# Altium footprint library custom-case.PcbLib: 483 footprints (part 20 of 31)
Each footprint in its own frame and in the unit in brackets; x right, y up, seen from the top. Pads: shape width x height; smd on the part's side, far side on the other; paste and mask are expansions set on the pad; w line width, h text height; cw(c..) or ccw(c..) is an arc to the next point about the centre after c.
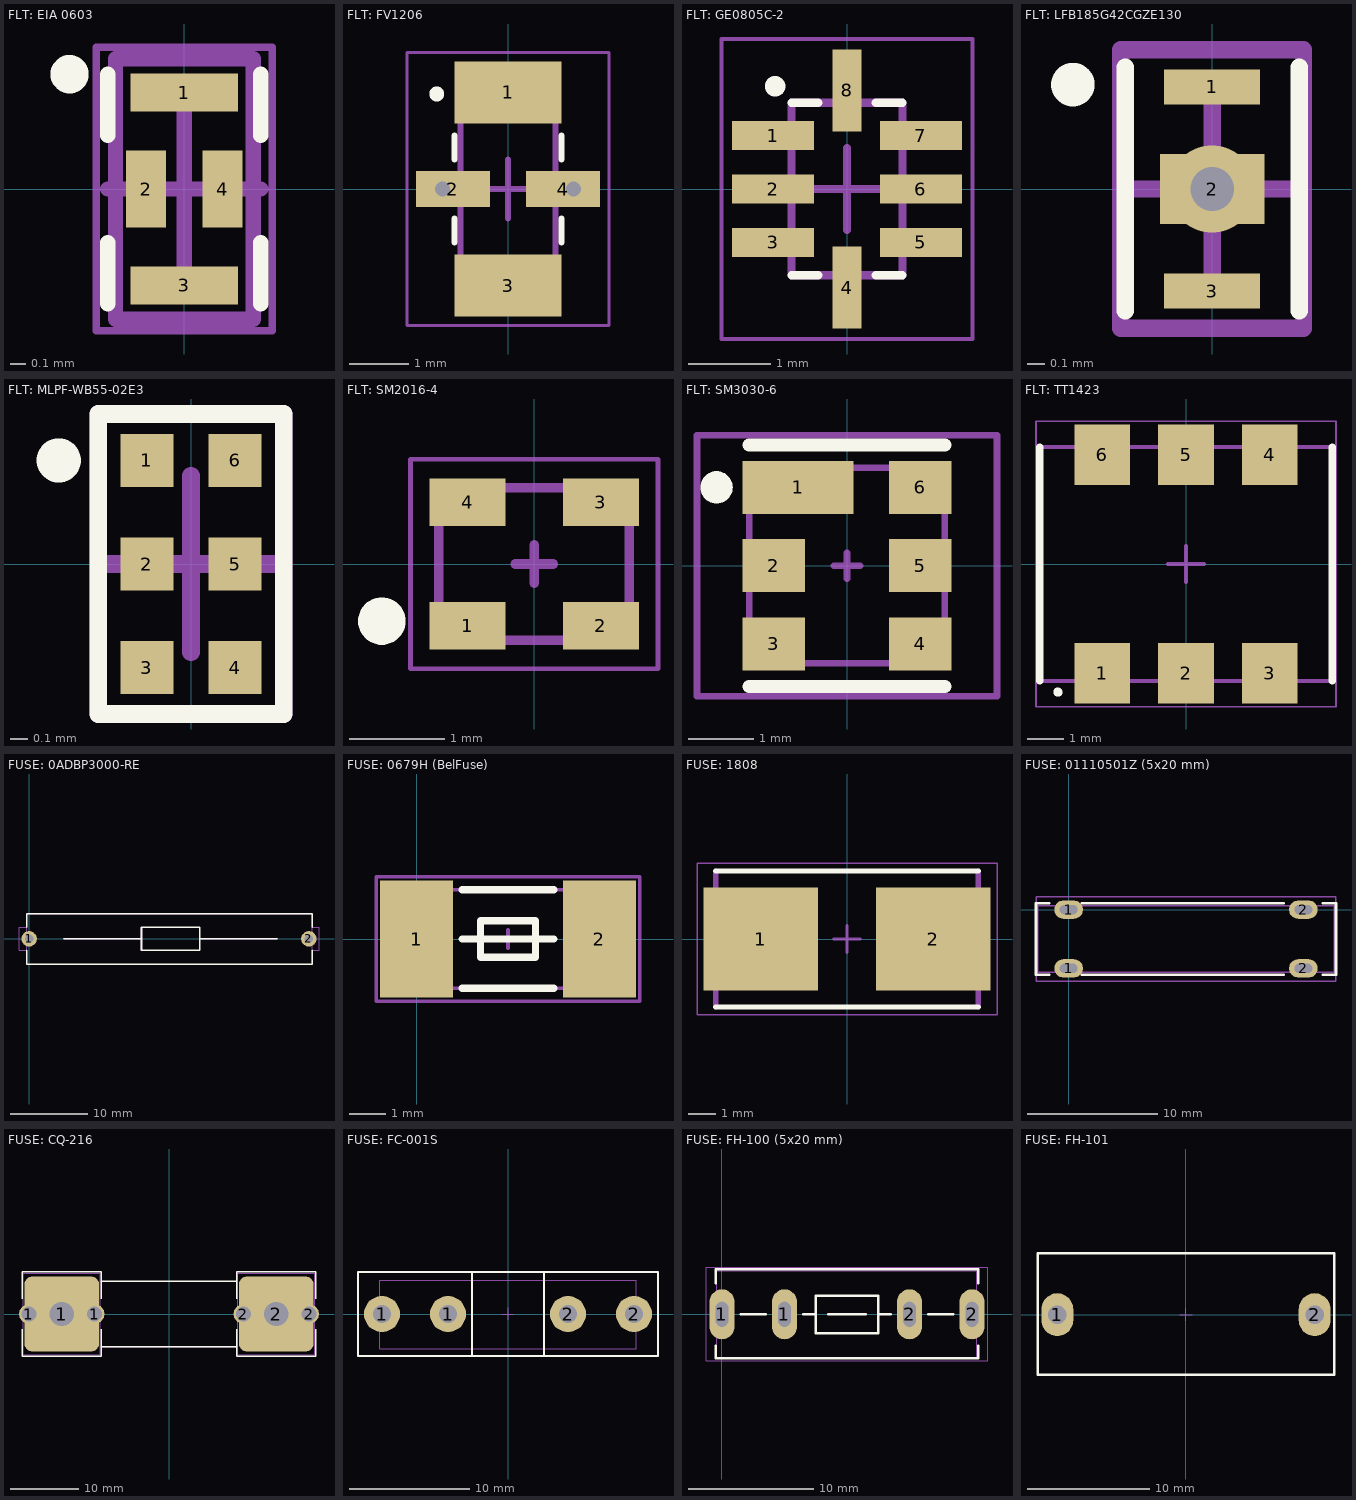
[diagram p19: the footprints below, top view; thin cyan lines are the x and y axes]

## FLT: EIA 0603 [mm] "Bandpass Filter"
height 12
pads (4):
  rect 0.7x0.25 smd: 1(0,0.63) 3(0,-0.63)
  rect 0.26x0.5 smd: 2(-0.25,0) 4(0.25,0)
Top Overlay:
  circle w0.2: c-0.75,0.75 r0.025
  lines w0.1: -0.5,-0.75 -0.5,-0.35 ; -0.5,0.35 -0.5,0.75 ; 0.5,-0.75 0.5,-0.35 ; 0.5,0.35 0.5,0.75
3D model:
  lines w0.1: -0.45,-0.85 0.45,-0.85 0.45,0.85 -0.45,0.85 -0.45,-0.85
Size Area:
  lines w0.05: -0.575,-0.925 0.575,-0.925 0.575,0.925 -0.575,0.925 -0.575,-0.925
  lines w0.1: -0.5,0 0.5,0 ; 0,-0.5 0,0.5
3D body "EIA0603.STEP": height 0.67, standoff 0.01, extent -0.4,-0.8 0.4,0.8

## FLT: FV1206 [mm] "Bandpass Filter"
height 12
pads (4):
  rect 1.8x1.04 smd: 1(0,1.625) 3(0,-1.625)
  rect 1.245x0.61 smd: 2(-0.927,0) 4(0.927,0)
via 1.1,0 diameter 0.5 hole 0.25
via -1.1,0 diameter 0.5 hole 0.25
Top Overlay:
  circle w0.2: c-1.2,1.6 r0.025
  lines w0.1: -0.9,-0.9 -0.9,-0.5 ; -0.9,0.5 -0.9,0.9 ; 0.9,-0.9 0.9,-0.5 ; 0.9,0.5 0.9,0.9
3D model:
  lines w0.1: -0.8,-1.6 0.8,-1.6 0.8,1.6 -0.8,1.6 -0.8,-1.6
Size Area:
  lines w0.05: -1.7,-2.3 1.7,-2.3 1.7,2.3 -1.7,2.3 -1.7,-2.3
  lines w0.1: -0.5,0 0.5,0 ; 0,-0.5 0,0.5
3D body "FV1206.STEP": height 1.01, standoff 0.03, extent -0.82,-1.62 0.82,1.62

## FLT: GE0805C-2 [mm] "Low Pass Filter"
height 12
pads (8):
  rect 1x0.35 smd: 1(-0.9,0.65) 2(-0.9,0) 3(-0.9,-0.65) 5(0.9,-0.65) 6(0.9,0) 7(0.9,0.65)
  rect 0.35x1 smd: 4(0,-1.2) 8(0,1.2)
Top Overlay:
  circle w0.2: c-0.875,1.25 r0.025
  lines w0.1: -0.675,-1.05 -0.35,-1.05 ; -0.675,1.05 -0.35,1.05 ; 0.35,-1.05 0.675,-1.05 ; 0.35,1.05 0.675,1.05
3D model:
  lines w0.1: -0.675,-1.05 0.675,-1.05 0.675,1.05 -0.675,1.05 -0.675,-1.05
Size Area:
  lines w0.05: -1.525,-1.825 1.525,-1.825 1.525,1.825 -1.525,1.825 -1.525,-1.825
  lines w0.1: -0.5,0 0.5,0 ; 0,-0.5 0,0.5
3D body "GE0805C-2.STEP": height 0.91, standoff -0.01, extent -0.635,-1.01 0.635,1.01

## FLT: LFB185G42CGZE130 [mm]
height 12
pads (3):
  rect 0.55x0.2 smd: 1(0,0.587) 3(0,-0.587)
  rect 0.6x0.4 smd: 2(0,0)
via 0,0 diameter 0.5 hole 0.25
Top Overlay:
  circle w0.2: c-0.8,0.6 r0.025
  lines w0.1: -0.5,-0.7 -0.5,0.7 ; 0.5,-0.7 0.5,0.7
3D model:
  lines w0.1: -0.525,-0.8 0.525,-0.8 0.525,0.8 -0.525,0.8 -0.525,-0.8
Size Area:
  lines w0.05: -0.525,-0.8 0.525,-0.8 0.525,0.8 -0.525,0.8 -0.525,-0.8
  lines w0.1: -0.5,0 0.5,0 ; 0,-0.5 0,0.5
3D body "LFB185G42CGZE130.STEP": height 0.67, standoff 0, extent -0.4,-0.8 0.4,0.8

## FLT: MLPF-WB55-02E3 [mm] "Integrated impedance matching and filter to STM32WB55Vx"
height 12
pads (6):
  rect 0.3x0.3 smd: 1(-0.25,0.587) 2(-0.25,0) 3(-0.25,-0.587) 4(0.25,-0.587) 5(0.25,0) 6(0.25,0.587)
Top Overlay:
  circle w0.2: c-0.75,0.587 r0.025
  lines w0.1: -0.525,-0.85 0.525,-0.85 0.525,0.85 -0.525,0.85 -0.525,-0.85
3D model:
  lines w0.1: -0.525,-0.85 0.525,-0.85 0.525,0.85 -0.525,0.85 -0.525,-0.85
Size Area:
  lines w0.05: -0.525,-0.85 -0.525,0.85 0.525,0.85 0.525,-0.85 -0.525,-0.85
  lines w0.1: -0.5,0 0.5,0 ; 0,-0.5 0,0.5
3D body "mlpf-wb55-01e3.STEP": height 0.41, standoff 0, extent -0.5,-0.8 0.5,0.8

## FLT: SM2016-4 [mm]
height 12
pads (5):
  rect 0.8x0.5 smd: 1(-0.7,-0.65) 2(0.7,-0.65) 3(0.7,0.65) 4(-0.7,0.65)
  round 0.5 on Top Overlay: ""(-1.6,-0.6)
Top Assy:
  circle w0.2: c-1.6,-0.6 r0.1
  lines w0.1: -1,-0.8 -1,0.8 1,0.8 1,-0.8 -1,-0.8
Size Area:
  lines w0.05: -1.3,-1.1 -1.3,1.1 1.3,1.1 1.3,-1.1 -1.3,-1.1
  lines w0.1: -0.2,0 0.2,0 ; 0,-0.2 0,0.2 ; -1,-0.8 -1,0.8 1,0.8 1,-0.8 -1,-0.8
3D body "User Library-XRCGB27M000F2P00R0.STEP": height 0.65, standoff 0, extent -1,-0.8 1,0.8

## FLT: SM3030-6 [mm] "SAW filter 3x3mm"
height 0.55
pads (7):
  rect 1.7x0.81 smd: 1(-0.75,1.2)
  rect 0.96x0.81 smd: 2(-1.125,0) 3(-1.125,-1.2) 4(1.125,-1.2) 5(1.125,0) 6(1.125,1.2)
  round 0.5 on Top Overlay: ""(-2,1.2)
Top Overlay:
  lines w0.2: -1.5,-1.85 1.5,-1.85 ; -1.5,1.85 1.5,1.85
Top Assy:
  circle w0.2: c-2,1.2 r0.1
  lines w0.1: -1.5,-1.5 -1.5,1.5 1.5,1.5 1.5,-1.5 -1.5,-1.5
Size Area:
  lines w0.1: -0.2,0 0.2,0 ; 0,-0.2 0,0.2 ; -2.3,-2 -2.3,2 2.3,2 2.3,1.2 2.3,-2 -2.3,-2
3D body "RenesasXL3225.STEP": height 0.91, standoff 0.01, extent -1.25,-1.6 1.25,1.6

## FLT: TT1423 [mm]
height 12
pads (6):
  rect 1.52x1.65 smd: 1(-2.29,-2.985) 2(0,-2.985) 3(2.29,-2.985) 4(2.29,2.985) 5(0,2.985) 6(-2.29,2.985)
Top Overlay:
  circle w0.2: c-3.5,-3.5 r0.025
  lines w0.2: -4,-3.2 -4,3.2 ; 4,-3.2 4,3.2
3D model:
  lines w0.1: -4,-3.2 -4,3.2 4,3.2 4,-3.2 -4,-3.2
Size Area:
  lines w0.05: -4.1,-3.9 -4.1,3.9 4.1,3.9 4.1,-3.9 -4.1,-3.9
  lines w0.1: -0.5,0 0.5,0 ; 0,-0.5 0,0.5
3D body "SYBP-92+.STEP": height 3.84, standoff 0.02, extent -3.935,-3.175 3.935,3.175

## FUSE: 0ADBP3000-RE [mm]
pads (2):
  round 2 hole 1.1: 1(0,0) 2(36.1,0)
Top Overlay:
  lines w0.2: -0.31,-1.5 -0.31,-3.3 36.51,-3.3 36.51,-1.5 ; -0.31,1.5 -0.31,3.25 36.51,3.25 36.51,1.5 ; 4.5,0 14.5,0 ; 22,0 32,0 ; 14.5,0 14.5,-1.5 22,-1.5 22,1.5 14.5,1.5 14.5,0
Top Assy:
  lines w0.1: 4.5,0 14.5,0 ; 22,0 32,0 ; 14.5,0 14.5,1.5 22,1.5 22,-1.5 14.5,-1.5 14.5,0 ; -0.31,-3.3 -0.31,3.25 36.51,3.25 36.51,-3.3 -0.31,-3.3
Size Area:
  lines w0.1: -1.3,-1.5 -0.31,-1.5 -0.31,-3.3 36.51,-3.3 36.51,-1.5 37.4,-1.5 37.4,1.5 36.51,1.5 36.51,3.25 -0.31,3.25 -0.31,1.5 -1.3,1.5 -1.3,-1.5
3D body "fuse.STEP": height 6.78, standoff -1.8, extent -0.31,-3.3 36.51,3.25

## FUSE: 0679H (BelFuse) [mm]
pads (2):
  rect 2x3.2 smd mask+0.075: 1(0,0) 2(5,0)
Top Overlay:
  lines w0.2: 1.25,-1.35 3.75,-1.35 ; 1.25,0 3.75,0 ; 1.25,1.35 3.75,1.35 ; 1.75,-0.5 1.75,0.5 3.25,0.5 3.25,-0.5 1.75,-0.5
Top Assy:
  lines w0.1: -0.55,-1.35 -0.55,1.35 5.55,1.35 5.55,-1.35 -0.55,-1.35
Size Area:
  lines w0.1: 2.25,0 2.75,0 ; 2.5,-0.25 2.5,0.25 ; -1.1,-1.7 6.1,-1.7 6.1,1.7 -1.1,1.7 -1.1,-1.7
3D body "User Library-fuse smd.STEP": height 2.69, standoff 0, extent -0.55,-1.35 5.55,1.34

## FUSE: 1808 [mm] "Fuse connector PCB SMD"
height 12
pads (2):
  rect 4.24x3.81 smd: 1(-3.19,0) 2(3.19,0)
Top Overlay:
  lines w0.2: -4.863,-2.515 4.863,-2.515 ; -4.863,2.515 4.863,2.515
3D model:
  lines w0.2: -4.863,-2.515 -4.863,2.515 ; 4.863,-2.515 4.863,2.515
Size Area:
  lines w0.05: -5.55,-2.8 5.55,-2.8 5.55,2.8 -5.55,2.8 -5.55,-2.8
  lines w0.1: -0.5,0 0.5,0 ; 0,-0.5 0,0.5
3D body "1808_01D.STEP": height 4.01, standoff 0, extent -4.6,-2.388 4.6,2.642

## FUSE: 01110501Z (5x20 mm) [mm]
pads (4):
  oval 2.2x1.4 hole 0.7 slot 1.35 at 0 deg: 1(0,-4.5) 1(0,0) 2(18,-4.5) 2(18,0)
Top Overlay:
  lines w0.2: -1.5,-5 -2.5,-5 -2.5,0.5 -1.5,0.5 ; 1,-5 16.5,-5 ; 1,0.5 16.5,0.5 ; 19.5,-5 20.5,-5 20.5,0.5 19.5,0.5
Top Assy:
  lines w0.1: 20.35,-4.8 20.35,-4.8 ; 20.35,-4.8 20.35,0.3 ; 20.35,-4.8 -2.35,-4.8 -2.35,0.3 20.35,0.3 ; 20.35,0.3 20.35,0.3
Size Area:
  lines w0.1: -2.5,-5.5 -2.5,1 20.5,1 20.5,-5.5 -2.5,-5.5
3D body "01110501Z.STEP": height 7.25, standoff -3.1, extent -2.35,-4.8 2.45,0.3
3D body "01110501Z.STEP": height 7.25, standoff -3.1, extent 15.55,-4.8 20.35,0.3
3D body "User Library-FUSIVEL.STEP": height 8.5, standoff 3.5, extent -1,-4.7 19,0.3

## FUSE: CQ-216 [mm]
pads (6):
  round 2.9 hole 2.2: 1(-20.65,0) 1(-10.95,0) 2(10.95,0) 2(20.65,0)
  rrect20% 11x11 / inner round 5.5 / far side round 5.5 hole 3.6: 1(-15.8,0) 2(15.8,0)
Top Overlay:
  lines w0.2: -21.65,-2.25 -21.65,-6.2 -9.95,-6.2 -9.95,-2.25 ; -21.65,2.25 -21.65,6.2 -9.95,6.2 -9.95,2.25 ; -9.95,-4.8 9.95,-4.8 ; -9.95,4.8 9.95,4.8 ; 9.95,-2.25 9.95,-6.2 21.65,-6.2 21.65,-2.25 ; 9.95,2.25 9.95,6.2 21.65,6.2 21.65,2.25
Mechanical 14:
  lines w0.1: -10.15,-4.8 10.15,-4.8 ; -10.15,4.8 10.15,4.8 ; -21.45,-6 -10.15,-6 -10.15,6 -21.45,6 -21.45,-6 ; 10.15,-6 21.45,-6 21.45,6 10.15,6 10.15,-6
3D body "FUSE_10X38_H_Part2.stp": height 17, standoff 7.3, extent -9,-4.85 9,4.85
3D body "FUSE_10X38_H_Part1.stp": height 17.3, standoff 7, extent -19,-5.15 19,5.15
3D body "FUSH_BUSSMANN_1A3400-09.stp": height 18, standoff -3.8, extent -21.35,-5.948 -10.25,5.948
3D body "FUSH_BUSSMANN_1A3400-09.stp": height 18, standoff -3.8, extent 10.25,-5.948 21.35,5.948

## FUSE: FC-001S [mm]
height 15
pads (4):
  round 3 hole 1.5: 1(-10.5,0) 1(-5,0) 2(5,0) 2(10.5,0)
Top Overlay:
  lines w0.2: -3,-3.5 -3,3.5 ; 3,-3.5 3,3.5 ; -12.5,-3.5 12.5,-3.5 12.5,3.5 -12.5,3.5 -12.5,-3.5
Top Assy:
  lines w0.1: -3,-2.9 -3,2.8 ; 3,-2.9 3,2.8 ; -10.7,-2.9 -10.7,2.8 10.7,2.8 10.7,-2.9 -10.7,-2.9
Size Area:
  lines w0.1: -0.5,0 0.5,0 ; 0,-0.5 0,0.5 ; -12.5,-3.5 12.5,-3.5 12.5,3.5 -12.5,3.5 -12.5,-3.5
3D body "FC-001S.STEP": height 5.5, standoff -2.81, extent -10.7,-2.9 10.7,2.798

## FUSE: FH-100 (5x20 mm) [mm]
pads (4):
  oval 2x4 hole 2 slot 1 at 0 deg: 1(0,0) 1(5,0) 2(15,0) 2(20,0)
Top Overlay:
  lines w0.2: -0.5,-2.5 -0.5,-3.5 20.5,-3.5 20.5,-2.5 ; -0.5,2.5 -0.5,3.6 20.5,3.6 20.5,2.5 ; 1.5,0 3.5,0 ; 6.5,0 7.5,0 ; 8.5,0 11.5,0 ; 12.5,0 13.5,0 ; 16.5,0 18.5,0 ; 7.5,-1.5 7.5,1.5 12.5,1.5 12.5,-1.5 7.5,-1.5
Top Assy:
  lines w0.1: 1.5,0 3.5,0 ; 6.5,0 7.5,0 ; 12.5,0 13.5,0 ; 16.5,0 18.5,0 ; 7.5,0 7.5,1.5 12.5,1.5 12.5,-1.5 7.5,-1.5 7.5,0 ; -0.4,-3.5 -0.4,3.5 20.4,3.5 20.4,-3.5 -0.4,-3.5
Size Area:
  lines w0.1: -1.25,-3.7 -1.25,3.75 21.25,3.75 21.25,-3.7 -1.25,-3.7
3D body "User Library-Clips FH-100 with fuse 5x20.STEP": height 9.99, standoff -3.5, extent -0.4,-3.5 20.4,3.5

## FUSE: FH-101 [mm] "Fuse connector PCB mount"
height 12
pads (2):
  oval 2.6x3.5 hole 1.5: 1(-10.5,0) 2(10.5,0)
Top Overlay:
  lines w0.2: -12.1,-4.9 12.1,-4.9 12.1,5 -12.1,5 -12.1,-4.9
Top Assy:
  lines w0.1: -12.1,-4.9 -12.1,5 12.1,5 12.1,-4.9 -12.1,-4.9
Size Area:
  lines w0.1: -0.5,0 0.5,0 ; 0,-0.5 0,0.5 ; -12.1,-4.9 12.1,-4.9 12.1,5 -12.1,5 -12.1,-4.9
3D body "����_��������������_FH-101.STEP": height 11, standoff -2, extent -12.024,-4.826 11.976,4.974